# Altium integrated library GBPC3510.IntLib: 1 symbol
Pins are listed as number, name and electrical type; pins without a type are passive.

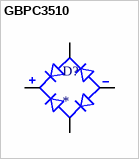
[diagram p0: symbol GBPC3510]

## GBPC3510
designator D?
Bridge Rectifier Single Phase Standard 1kV QC Terminal GBPC; MP: GBPC3510; MF: Fairchild Semiconductor; Package: 4-4 Fairchild Semiconductor; Purchase-URL: https://pricing.snapeda.com/search/part/GBPC3510/?ref=eda; SnapEDA_Link: https://www.snapeda.com/parts/GBPC3510/Fairchild+Semiconductor/view-part/?ref=snap; Value: *; Availability: In Stock; Price: None; Check_prices: https://www.snapeda.com/parts/GBPC3510/Fairchild+Semiconductor/view-part/?ref=eda
footprint DIOB_GBPC3510
pins: AC1, AC2, NEG, POS